# Altium integrated library US1JFA.IntLib: 1 symbol
Pins are listed as number, name and electrical type; pins without a type are passive.

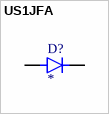
[diagram p0: symbol US1JFA]

## US1JFA
designator D?
Diode Standard 600V 1A Surface Mount SOD-123FA; MF: ON Semiconductor; MP: US1JFA; SnapEDA_Link: https://www.snapeda.com/parts/US1JFA/Onsemi/view-part/?ref=snap; Package: SOD-123 FL-2 ON Semiconductor; Value: *; Check_prices: https://www.snapeda.com/parts/US1JFA/Onsemi/view-part/?ref=eda
footprint DIO_US1JFA
pins: 1 K, 2 A